# Altium schematic symbol library 10nF_25V.SchLib: 1 symbol
Pins are listed as number, name and electrical type; pins without a type are passive.

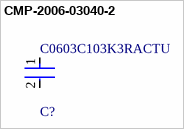
[diagram p0: symbol CMP-2006-03040-2]

## CMP-2006-03040-2
designator C?, comment C0603C103K3RACTU
CAP CER 10000PF 25V 10% X7R 0603; Manufacturer: KEMET; Material: Ceramic; Capacitance: 10,000 pF; Value: 10,000 pF; Tolerance: 0.1; Automotive Grade: Grade 1; Temperature Coefficient: 30ppm/°C; Lead Free: Yes; Temperature Range High: +125°C; Temperature Characteristic: X7R; Device Class L2: Capacitors; Mouser Description: Multilayer Ceramic Capacitors MLCC - SMD/SMT 25volts 10000pF X7R 10%; ComponentLink2Description: Datasheet; Height: 0.87mm; Digikey Description: CAP CER 10000PF 25V 10% X7R 0603; ComponentLink2URL: https://api.kemet.com/component-edge/download/datasheet/C0603C100J5GACAUTO.pdf; Octopart: https://octopart.com/c0603c103k3ractu-kemet-89103; Category: Cap; Package: C0603C-CF; Voltage Rating: 25 V; Device Class L3: Ceramic Capacitors; Automotive: Yes; RoHS: TRUE; Temperature: -55°C to +125°C; Temperature Range Low: -55°C; Device Class L1: Passive Components; Manufacturer Part Number: C0603C103K3RACTU
footprint FP-C0603C-CF-IPC_B
footprint FP-C0603C-CF-MFG
footprint FP-C0603C-CF-IPC_A
footprint FP-C0603C-CF-IPC_C
pins: 1, 2